# Altium footprint library FT8.PcbLib: 40 footprints (part 2 of 3)
Each footprint in its own frame and in the unit in brackets; x right, y up, seen from the top. Pads: shape width x height; smd on the part's side, far side on the other; paste and mask are expansions set on the pad; w line width, h text height; cw(c..) or ccw(c..) is an arc to the next point about the centre after c.
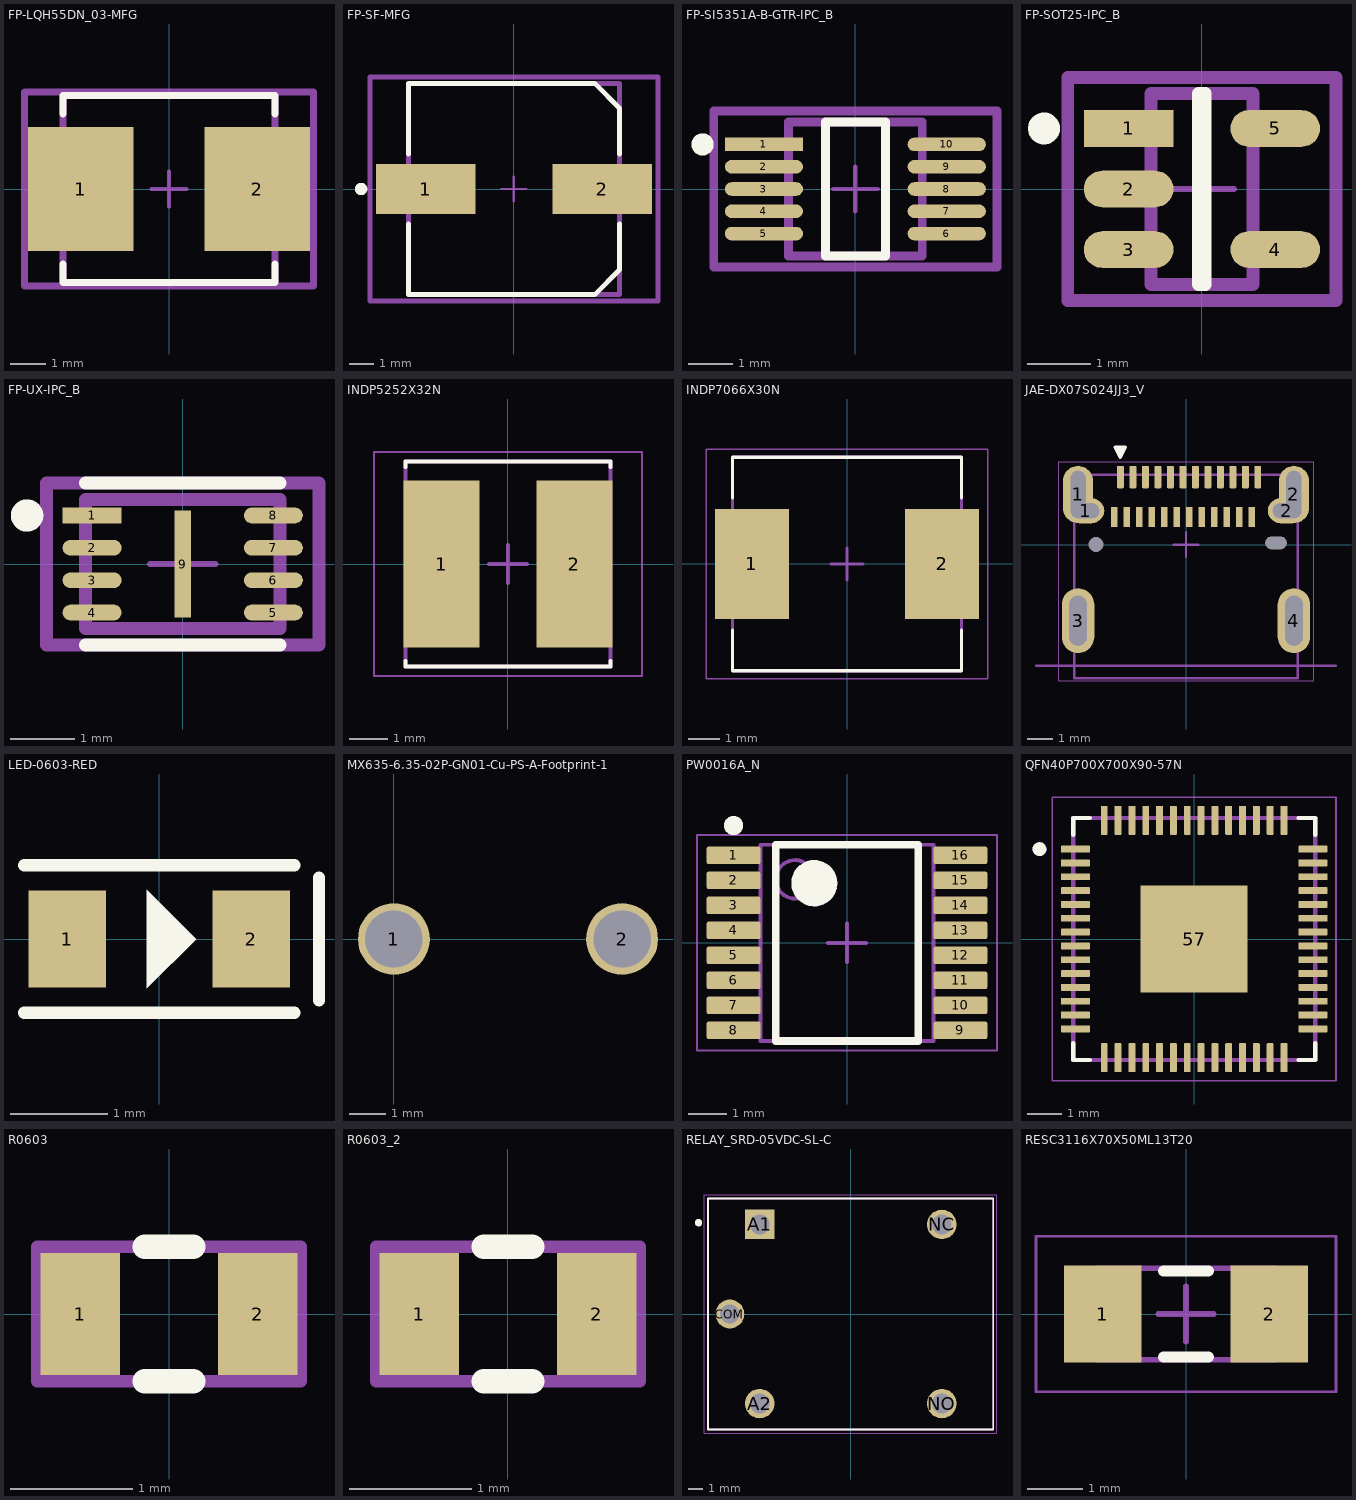
[diagram p1: the footprints below, top view; thin cyan lines are the x and y axes]

## FP-LQH55DN_03-MFG [mm]
pads (2):
  rect 3x3.5 smd paste+0 mask+0: 1(-2.5,0) 2(2.5,0)
Top Overlay:
  lines w0.2: -3,-2.125 -3,-2.65 3,-2.65 3,-2.125 ; -3,2.125 -3,2.65 3,2.65 3,2.125
Top 3D Body:
  lines w0.2: -3,-2.65 3,-2.65 3,2.65 -3,2.65 -3,-2.65
Top Component Center:
  lines w0.1: -0.5,0 0.5,0 ; 0,-0.5 0,0.5
Top Assembly:
  lines w0.2: -4.1,-2.75 4.1,-2.75 4.1,2.75 -4.1,2.75 -4.1,-2.75
  text ".Designator" at 0,0.188 h1
Top Courtyard:
  lines w0.2: -4.1,-2.75 4.1,-2.75 4.1,2.75 -4.1,2.75 -4.1,-2.75
3D body "Ind_Murata_LQH55DN150M03L_eec.STEP": height 0.25, standoff 0, extent -4.1,-2.75 4.1,2.75

## FP-SF-MFG [mm]
pads (2):
  rect 4x2 smd paste+0 mask+0: 1(-3.55,0) 2(3.55,0)
Top Overlay:
  circle w0.25: c-6.15,0 r0.125
  lines w0.2: -4.25,-1.4 -4.25,-4.25 3.25,-4.25 4.25,-3.25 4.25,-1.4 ; -4.25,1.4 -4.25,4.25 3.25,4.25 4.25,3.25 4.25,1.4
Top 3D Body:
  lines w0.2: -4.25,-4.25 -4.25,4.25 4.25,4.25 4.25,-4.25 -4.25,-4.25
Top Component Center:
  lines w0.1: -0.5,0 0.5,0 ; 0,-0.5 0,0.5
Top Assembly:
  lines w0.2: -5.8,-4.5 -5.8,4.5 5.8,4.5 5.8,-4.5 -5.8,-4.5
  text ".Designator" at 0,0.188 h1
Top Courtyard:
  lines w0.2: -5.8,-4.5 -5.8,4.5 5.8,4.5 5.8,-4.5 -5.8,-4.5
3D body "Cap_Panasonic_Electronic_Components_EEE-1EA101P_eec.STEP": height 0.25, standoff 0, extent -5.8,-4.5 5.8,4.5

## FP-SI5351A-B-GTR-IPC_B [mm]
pads (10):
  rect 1.754x0.305 smd paste+0 mask+0: 1(-2.05,1)
  rrect100% 1.754x0.305 smd paste+0 mask+0: 2(-2.05,0.5) 3(-2.05,0) 4(-2.05,-0.5) 5(-2.05,-1) 6(2.05,-1) 7(2.05,-0.5) 8(2.05,0) 9(2.05,0.5) 10(2.05,1)
Top Overlay:
  circle w0.25: c-3.427,1 r0.125
  lines w0.2: -0.673,-1.5 0.673,-1.5 0.673,1.5 -0.673,1.5 -0.673,-1.5
Top 3D Body:
  lines w0.2: -1.5,-1.5 1.5,-1.5 1.5,1.5 -1.5,1.5 -1.5,-1.5
Top Component Center:
  lines w0.1: -0.5,0 0.5,0 ; 0,-0.5 0,0.5
Top Assembly:
  lines w0.2: -3.177,-1.75 3.177,-1.75 3.177,1.75 -3.177,1.75 -3.177,-1.75
  text ".Designator" at 0,0.188 h1
Top Courtyard:
  lines w0.2: -3.177,-1.75 3.177,-1.75 3.177,1.75 -3.177,1.75 -3.177,-1.75
3D body "IC_Silicon_Laboratories_SI5351A-B-GTR_eec.STEP": height 0.25, standoff 0, extent -3.177,-1.75 3.177,1.75

## FP-SOT25-IPC_B [mm]
pads (5):
  rect 1.407x0.576 smd paste+0 mask+0: 1(-1.151,0.95)
  rrect100% 1.407x0.576 smd paste+0 mask+0: 2(-1.151,0) 3(-1.151,-0.95) 4(1.151,-0.95) 5(1.151,0.95)
Top Overlay:
  circle w0.25: c-2.479,0.95 r0.125
  lines w0.2: -0.053,-1.5 0.053,-1.5 0.053,1.5 -0.053,1.5 -0.053,-1.5
Top 3D Body:
  lines w0.2: -0.8,-1.5 -0.8,1.5 0.8,1.5 0.8,-1.5 -0.8,-1.5
Top Component Center:
  lines w0.1: -0.5,0 0.5,0 ; 0,-0.5 0,0.5
Top Assembly:
  lines w0.2: -2.104,-1.75 -2.104,1.75 2.104,1.75 2.104,-1.75 -2.104,-1.75
  text ".Designator" at 0,0.188 h1
Top Courtyard:
  lines w0.2: -2.104,-1.75 -2.104,1.75 2.104,1.75 2.104,-1.75 -2.104,-1.75
3D body "IC_Diodes_Inc_AP2127K-3_3TRG1_eec.STEP": height 0.25, standoff 0, extent -2.104,-1.75 2.104,1.75

## FP-UX-IPC_B [mm]
pads (9):
  rect 0.911x0.242 smd paste+0 mask+0: 1(-1.401,0.75)
  rrect100% 0.911x0.242 smd paste+0 mask+0: 2(-1.401,0.25) 3(-1.401,-0.25) 4(-1.401,-0.75) 5(1.401,-0.75) 6(1.401,-0.25) 7(1.401,0.25) 8(1.401,0.75)
  rect 0.25x1.65 smd paste-1000 mask+0: 9(0,0)
Top Overlay:
  circle w0.25: c-2.406,0.75 r0.125
  lines w0.2: -1.5,-1.25 1.5,-1.25 ; -1.5,1.25 1.5,1.25
Top Paste:
  rectangle: -0.055,-0.755 0.055,0.755
Top 3D Body:
  lines w0.2: -1.5,-1 1.5,-1 1.5,1 -1.5,1 -1.5,-1
Top Component Center:
  lines w0.1: -0.5,0 0.5,0 ; 0,-0.5 0,0.5
Top Assembly:
  lines w0.2: -2.106,-1.25 2.106,-1.25 2.106,1.25 -2.106,1.25 -2.106,-1.25
  text ".Designator" at 0,-0.001 h1
Top Courtyard:
  lines w0.2: -2.106,-1.25 2.106,-1.25 2.106,1.25 -2.106,1.25 -2.106,-1.25
3D body "IC_Winbond_W25Q80DVUXIE_TR_eec.STEP": height 0.25, standoff 0, extent -2.106,-1.25 2.106,1.25

## INDP5252X32N [mm] "Precision Wire Wound Inductor, 2-Leads, Body 5,20x5,20mm, IPC Medium Density"
height 3.2
pads (2):
  rect 2x4.4 smd: 1(-1.75,0) 2(1.75,0)
Top Overlay:
  lines w0.1: -2.7,-2.55 -2.7,-2.7 2.7,-2.7 2.7,-2.55 ; -2.7,2.55 -2.7,2.7 2.7,2.7 2.7,2.55
Top Assembly:
  lines w0.1: -2.7,-2.7 2.7,-2.7 2.7,2.7 -2.7,2.7 -2.7,-2.7
Top Courtyard:
  lines w0.05: -3.525,-2.95 3.525,-2.95 3.525,2.95 -3.525,2.95 -3.525,-2.95
  lines w0.1: -0.5,0 0.5,0 ; 0,-0.5 0,0.5
3D body "SRR5228A-100M.stp": height 3.2, standoff 0, extent -2.6,-2.6 2.6,2.6

## INDP7066X30N [mm] "Precision Wire Wound Inductor, 2-Leads, Body 7,00x6,60mm, IPC Medium Density"
height 3
pads (2):
  rect 2.35x3.5 smd: 1(-3.025,0) 2(3.025,0)
Top Overlay:
  lines w0.1: -3.65,-2.1 -3.65,-3.4 3.65,-3.4 3.65,-2.1 ; -3.65,2.1 -3.65,3.4 3.65,3.4 3.65,2.1
Top Assembly:
  lines w0.1: -3.65,-3.4 -3.65,3.4 3.65,3.4 3.65,-3.4 -3.65,-3.4
Top Courtyard:
  lines w0.05: -4.475,-3.65 -4.475,3.65 4.475,3.65 4.475,-3.65 -4.475,-3.65
  lines w0.1: -0.5,0 0.5,0 ; 0,-0.5 0,0.5
3D body: height 3, standoff 0, extent -3.65,-3.4 3.65,3.4

## JAE-DX07S024JJ3_V [mm] "THD, 24-Leads, Body 8.17x8.94mm, Pitch 0.5mm"
height 3.29
pads (32):
  oval 1.2x2.3 hole 0.6 slot 1.9 at 90 deg: 1(-4.32,2) 2(4.32,2)
  oval 1.5x1 hole 0.6 slot 1.1 at 0 deg: 1(-4.02,1.35) 2(4.02,1.35)
  oval 1.3x2.6 hole 0.7 slot 2 at 90 deg: 3(-4.32,-3.05) 4(4.32,-3.05)
  rrect25% 0.27x0.9 smd: A1(-2.625,2.7) A2(-2.125,2.7) A3(-1.625,2.7) A4(-1.125,2.7) A5(-0.625,2.7) A6(-0.125,2.7) A7(0.375,2.7) A8(0.875,2.7) A9(1.375,2.7) A10(1.875,2.7) A11(2.375,2.7) A12(2.875,2.7)
  rrect25% 0.27x0.8 smd: B1(2.625,1.1) B2(2.125,1.1) B3(1.625,1.1) B4(1.125,1.1) B5(0.625,1.1) B6(0.125,1.1) B7(-0.375,1.1) B8(-0.875,1.1) B9(-1.375,1.1) B10(-1.875,1.1) B11(-2.375,1.1) B12(-2.875,1.1)
  round 0 hole 0.6 unplated: H1(-3.6,0)
  round 0 hole 0.5 slot 0.85 at 0 deg unplated: H2(3.6,0.065)
Top Overlay:
  region: -2.825,3.89 -2.425,3.89 -2.625,3.49
  lines w0.15: -2.825,3.89 -2.425,3.89 -2.625,3.49 -2.825,3.89
Top 3D Body:
  text "Board Edge" at -1.1,-5.3 h0.5
Top Designator:
  text ".Designator" at -1.905,1.778 h0.6
Top Assembly:
  lines w0.1: -6,-4.85 6,-4.85 ; -4.47,-5.35 4.47,-5.35 4.47,2.8 -4.47,2.8 -4.47,-5.35
Top Courtyard:
  lines w0.05: -5.1,-5.45 5.1,-5.45 5.1,3.3 -5.1,3.3 -5.1,-5.45
  lines w0.1: -0.5,0 0.5,0 ; 0,-0.5 0,0.5
3D body "CX90B1-24P_4800497000_3D.stp": height 3.16, standoff -0.6, extent -4.47,-5.35 4.47,2.8

## LED-0603-RED [mm]
pads (2):
  rect 0.8x1 smd: 1(-0.95,0) 2(0.95,0)
Top Overlay:
  region: -0.127,0.508 -0.127,-0.508 0.381,0
  lines w0.127: -1.397,-0.762 1.397,-0.762 ; -1.397,0.762 1.397,0.762 ; 1.651,-0.635 1.651,0.635
3D body: height 0.6, standoff 0, extent -0.8,-0.4 0.8,0.4

## MX635-6.35-02P-GN01-Cu-PS-A-Footprint-1 [mm]
pads (2):
  round 2 hole 1.6: 1(0,0) 2(6.35,0)
3D body "1714955.stp": height 20.75, standoff -5.85, extent -3.775,-7.901 9.525,4.599

## PW0016A_N [mm] "SOP, 16-Leads, Body 5.1x4.5mm, Pitch 0.65mm, IPC Medium Density"
height 1.2
pads (16):
  rrect22% 1.4x0.45 smd: 1(-2.95,2.275) 2(-2.95,1.625) 3(-2.95,0.975) 4(-2.95,0.325) 5(-2.95,-0.325) 6(-2.95,-0.975) 7(-2.95,-1.625) 8(-2.95,-2.275) 9(2.95,-2.275) 10(2.95,-1.625) 11(2.95,-0.975) 12(2.95,-0.325) 13(2.95,0.325) 14(2.95,0.975) 15(2.95,1.625) 16(2.95,2.275)
Top Overlay:
  circle w0.6: c-0.85,1.55 r0.3
  circle w0.25: c-2.95,3.05 r0.125
  lines w0.2: -1.85,-2.55 1.85,-2.55 1.85,2.55 -1.85,2.55 -1.85,-2.55
Mechanical 1:
  text ".Designator" at -1.524,-0.508 h1.02
Top Assembly:
  circle w0.1: c-1.35,1.65 r0.5
  lines w0.1: -2.25,-2.55 2.25,-2.55 2.25,2.55 -2.25,2.55 -2.25,-2.55
Top Courtyard:
  lines w0.05: -3.9,-2.8 3.9,-2.8 3.9,2.8 -3.9,2.8 -3.9,-2.8
  lines w0.1: -0.5,0 0.5,0 ; 0,-0.5 0,0.5
3D body "PW0016AakaMTC16.stp": height 1, standoff 0, extent -3.21,-2.5 3.21,2.5

## QFN40P700X700X90-57N [mm]
height 0.9
pads (57):
  rrect25% 0.84x0.2 smd: 1(-3.435,2.6) 2(-3.435,2.2) 3(-3.435,1.8) 4(-3.435,1.4) 5(-3.435,1) 6(-3.435,0.6) 7(-3.435,0.2) 8(-3.435,-0.2) 9(-3.435,-0.6) 10(-3.435,-1) 11(-3.435,-1.4) 12(-3.435,-1.8) 13(-3.435,-2.2) 14(-3.435,-2.6) 29(3.435,-2.6) 30(3.435,-2.2) 31(3.435,-1.8) 32(3.435,-1.4) 33(3.435,-1) 34(3.435,-0.6) 35(3.435,-0.2) 36(3.435,0.2) 37(3.435,0.6) 38(3.435,1) 39(3.435,1.4) 40(3.435,1.8) 41(3.435,2.2) 42(3.435,2.6)
  rrect25% 0.2x0.84 smd: 15(-2.6,-3.435) 16(-2.2,-3.435) 17(-1.8,-3.435) 18(-1.4,-3.435) 19(-1,-3.435) 20(-0.6,-3.435) 21(-0.2,-3.435) 22(0.2,-3.435) 23(0.6,-3.435) 24(1,-3.435) 25(1.4,-3.435) 26(1.8,-3.435) 27(2.2,-3.435) 28(2.6,-3.435) 43(2.6,3.435) 44(2.2,3.435) 45(1.8,3.435) 46(1.4,3.435) 47(1,3.435) 48(0.6,3.435) 49(0.2,3.435) 50(-0.2,3.435) 51(-0.6,3.435) 52(-1,3.435) 53(-1.4,3.435) 54(-1.8,3.435) 55(-2.2,3.435) 56(-2.6,3.435)
  rect 3.1x3.1 smd paste-0.57: 57(0,0)
Top Overlay:
  circle w0.2: c-4.475,2.6 r0.1
  lines w0.127: -3.5,-3.02 -3.5,-3.5 -3.02,-3.5 ; -3.5,3.02 -3.5,3.5 -3.02,3.5 ; 3.02,-3.5 3.5,-3.5 3.5,-3.02 ; 3.02,3.5 3.5,3.5 3.5,3.02
Top Assembly:
  circle w0.2: c-4.475,2.6 r0.1
  lines w0.127: -3.5,-3.5 3.5,-3.5 3.5,3.5 -3.5,3.5 -3.5,-3.5
Top Courtyard:
  lines w0.05: -4.105,-4.105 4.105,-4.105 4.105,4.105 -4.105,4.105 -4.105,-4.105
3D body "step_temp.STEP": height 0.9, standoff 0, extent -3.5,-3.5 3.5,3.5

## R0603 [mm]
pads (2):
  rect 0.65x1 smd: 1(-0.725,0) 2(0.725,0)
Top Overlay:
  lines w0.2: -0.2,-0.55 0.2,-0.55 ; -0.2,0.55 0.2,0.55
Bottom 3D Body:
  text ".Comment" at -0.55,-0.25 h0.8
Mechanical 7:
  text ".Designator" at -0.6,-0.25 h0.8
Top Courtyard:
  lines w0.1: -1.075,-0.55 1.075,-0.55 1.075,0.55 -1.075,0.55 -1.075,-0.55
3D body: height 0.45, standoff 0, extent 0.5,-0.4 0.8,0.4
3D body: height 0.45, standoff 0, extent -0.8,-0.4 -0.5,0.4
3D body: height 0.45, standoff 0, extent -0.5,-0.4 0.5,0.4
3D body "res_0603.step": height 0.4, standoff 0, extent -0.8,-0.4 0.8,0.4

## R0603_2 [mm]
pads (2):
  rect 0.65x1 smd: 1(-0.725,0) 2(0.725,0)
Top Overlay:
  lines w0.2: -0.2,-0.55 0.2,-0.55 ; -0.2,0.55 0.2,0.55
Bottom 3D Body:
  text ".Comment" at -0.55,-0.25 h0.8
Mechanical 7:
  text ".Designator" at -0.6,-0.25 h0.8
Top Courtyard:
  lines w0.1: -1.075,-0.55 1.075,-0.55 1.075,0.55 -1.075,0.55 -1.075,-0.55
3D body: height 0.45, standoff 0, extent 0.5,-0.4 0.8,0.4
3D body: height 0.45, standoff 0, extent -0.8,-0.4 -0.5,0.4
3D body: height 0.45, standoff 0, extent -0.5,-0.4 0.5,0.4
3D body "res_0603.step": height 0.4, standoff 0, extent -0.8,-0.4 0.8,0.4

## RELAY_SRD-05VDC-SL-C [mm]
pads (5):
  rect 1.98x1.98 / inner round 1.98 / far side rect 1.98x1.98 hole 1.32: A1(-6.1,6)
  round 1.98 hole 1.32: A2(-6.1,-6) NC(6.1,6) NO(6.1,-6)
  round 1.935 hole 1.29: COM(-8.1,0)
Top Overlay:
  circle w0.3: c-10.2,6.119 r0.1
  lines w0.127: -9.55,-7.75 -9.55,7.75 9.55,7.75 9.55,-7.75 -9.55,-7.75
Top Assembly:
  lines w0.127: -9.55,-7.75 -9.55,7.75 9.55,7.75 9.55,-7.75 -9.55,-7.75
Top Courtyard:
  lines w0.05: -9.8,-8 -9.8,8 9.8,8 9.8,-8 -9.8,-8
3D body "step_temp.STEP": height 15.8, standoff -3, extent -9.6,-7.8 9.6,7.8

## RESC3116X70X50ML13T20 [mm] "Chip Resistor, 2-Leads, Body 3.25x1.65mm, IPC Low Density"
height 0.7
pads (2):
  rect 1.4x1.75 smd: 1(-1.5,0) 2(1.5,0)
Top Overlay:
  lines w0.2: -0.4,-0.775 0.4,-0.775 ; -0.4,0.775 0.4,0.775
Top Assembly:
  lines w0.1: -1.625,-0.825 1.625,-0.825 1.625,0.825 -1.625,0.825 -1.625,-0.825
Top Courtyard:
  lines w0.05: -2.7,-1.4 2.7,-1.4 2.7,1.4 -2.7,1.4 -2.7,-1.4
  lines w0.1: -0.5,0 0.5,0 ; 0,-0.5 0,0.5
3D body "RESC3115X07M.step": height 0.7, standoff 0, extent -1.625,-0.825 1.625,0.825